# EAGLE library part 046841015100846+ (library 046841015100846+)
FFC & FPC Connectors Source: Datasheet <https://www.mouser.de/datasheet/2/909/6841-1381151.pdf>
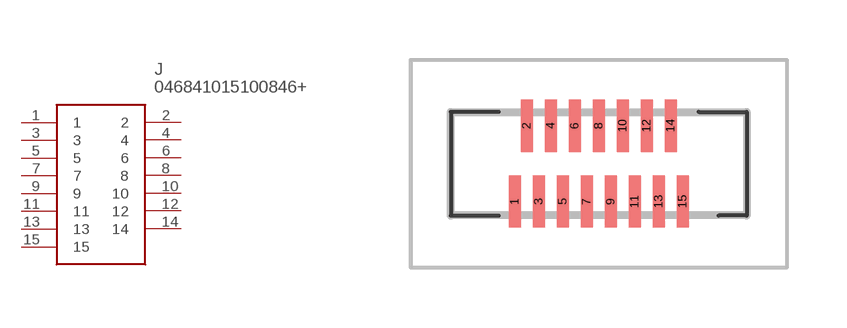
[diagram p0: symbol with the pads of 046841015100846; footprint 046841015100846]

Designator prefix J

## 046841015100846+ (Description: FFC & FPC Connectors; Height: 3.6mm; Manufacturer_Name: Kyocera AVX; Manufacturer_Part_Number: 046841015100846+; Mouser_Part_Number: 346-046841015100846+; Mouser_Price-Stock: https://www.mouser.co.uk/ProductDetail/Kyocera-Electronic-Components/046841015100846%2b?qs=PzGy0jfpSMuyQjeU3eGyKw%3D%3D)  [046841015100846]
1  1
2  2
3  3
4  4
5  5
6  6
7  7
8  8
9  9
10  10
11  11
12  12
13  13
14  14
15  15

## Footprint 046841015100846 (pad centres in mm)
046841015100846+-3
smd 0.3 x 1.3: 1 -2.1,-0.95; 2 -1.8,0.95; 3 -1.5,-0.95; 4 -1.2,0.95; 5 -0.9,-0.95; 6 -0.6,0.95; 7 -0.3,-0.95; 8 0,0.95; 9 0.3,-0.95; 10 0.6,0.95; 11 0.9,-0.95; 12 1.2,0.95; 13 1.5,-0.95; 14 1.8,0.95; 15 2.1,-0.95